# Altium footprint library PcbLib_PD.PcbLib: 1 footprints
Each footprint in its own frame and in the unit in brackets; x right, y up, seen from the top. Pads: shape width x height; smd on the part's side, far side on the other; paste and mask are expansions set on the pad; w line width, h text height; cw(c..) or ccw(c..) is an arc to the next point about the centre after c.
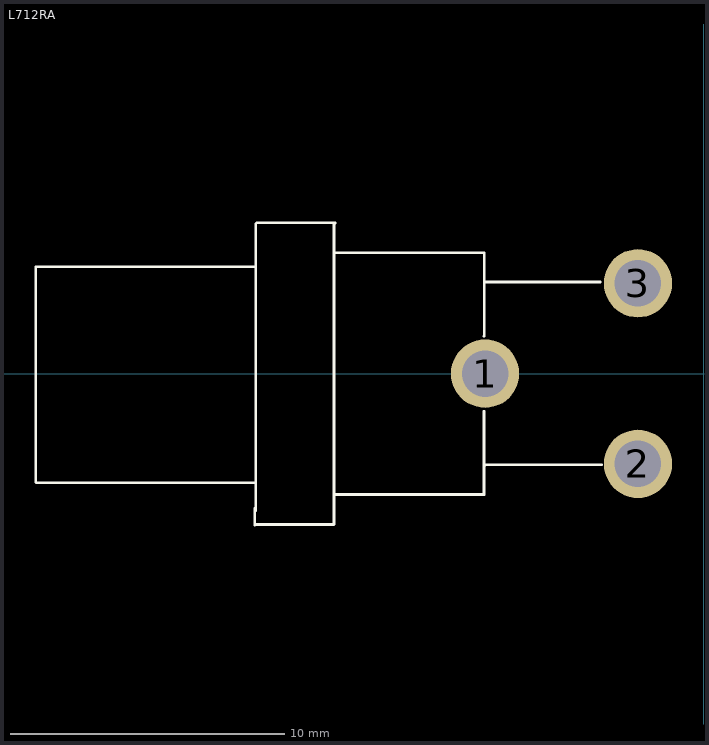
[diagram p0: the footprint, top view; thin cyan lines are the x and y axes]

## L712RA [mm]
pads (3):
  round 2.5 hole 1.7: 1(-7.99,0) 2(-2.4,-3.3) 3(-2.4,3.3)
Top Overlay:
  lines w0.1: -16.406,3.91 -24.407,3.91 -24.407,-3.964 -24.382,-3.99 -16.381,-3.99 ; -16.381,-4.904 -16.406,-4.93 -16.406,-5.539 -16.381,-5.514 -13.511,-5.514 -13.511,4.875 ; -16.371,-5 -16.371,5 -16.371,5.469 -16.33,5.51 -16.051,5.51 -13.46,5.51 -13.511,5.459 -13.511,4.824 ; -13.511,-4.422 -13.507,-4.418 -8.022,-4.418 ; -13.511,4.367 -13.458,4.42 -8.022,4.42 -8.022,1.372 -8.024,1.37 ; -8.024,-4.422 -8.024,-1.374 ; -7.999,-3.355 -7.974,-3.329 -3.732,-3.329 ; -7.999,3.325 -7.974,3.351 -3.783,3.351
3D body "L712RAmod.stp": height 13.9, standoff -3.55, extent -24.407,-5.539 -1.06,5.485